# EAGLE library part FS8205A (library C3_SCOUT_REVC)
TECH PUBLIC 8205A / C7419210. Dual common-drain TSSOP-8; pads 1/8 drain, 2/3 S1, 4 G1, 5 G2, 6/7 S2. Qualify overcurrent trip with lower RDS(on).
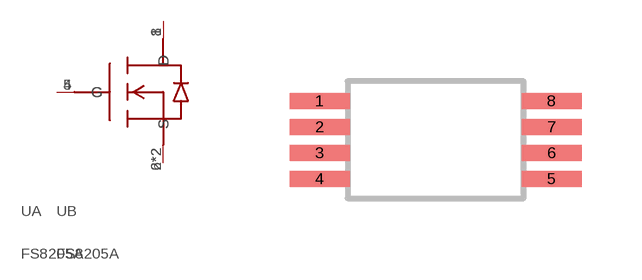
[diagram p7: symbol with the pads of TSSOP8-0.65; footprint TSSOP8-0.65]

Designator prefix U; gates A=NMOS_A B=NMOS_B

## FS8205A (LCSC_PART: C7419210; MANUFACTURER: TECH PUBLIC; MPN: 8205A)  [TSSOP8-0.65]
1  A:D  pas
2  A:S  pas
3  A:S  pas
4  A:G  in
5  B:G  in
6  B:S  pas
7  B:S  pas
8  B:D  pas

## Footprint TSSOP8-0.65 (pad centres in mm)
smd 1.5 x 0.4: 1 -2.9,0.975; 2 -2.9,0.325; 3 -2.9,-0.325; 4 -2.9,-0.975; 5 2.9,-0.975; 6 2.9,-0.325; 7 2.9,0.325; 8 2.9,0.975